# Altium footprint library Footprint.PcbLib: 411 footprints (part 11 of 26)
Each footprint in its own frame and in the unit in brackets; x right, y up, seen from the top. Pads: shape width x height; smd on the part's side, far side on the other; paste and mask are expansions set on the pad; w line width, h text height; cw(c..) or ccw(c..) is an arc to the next point about the centre after c.
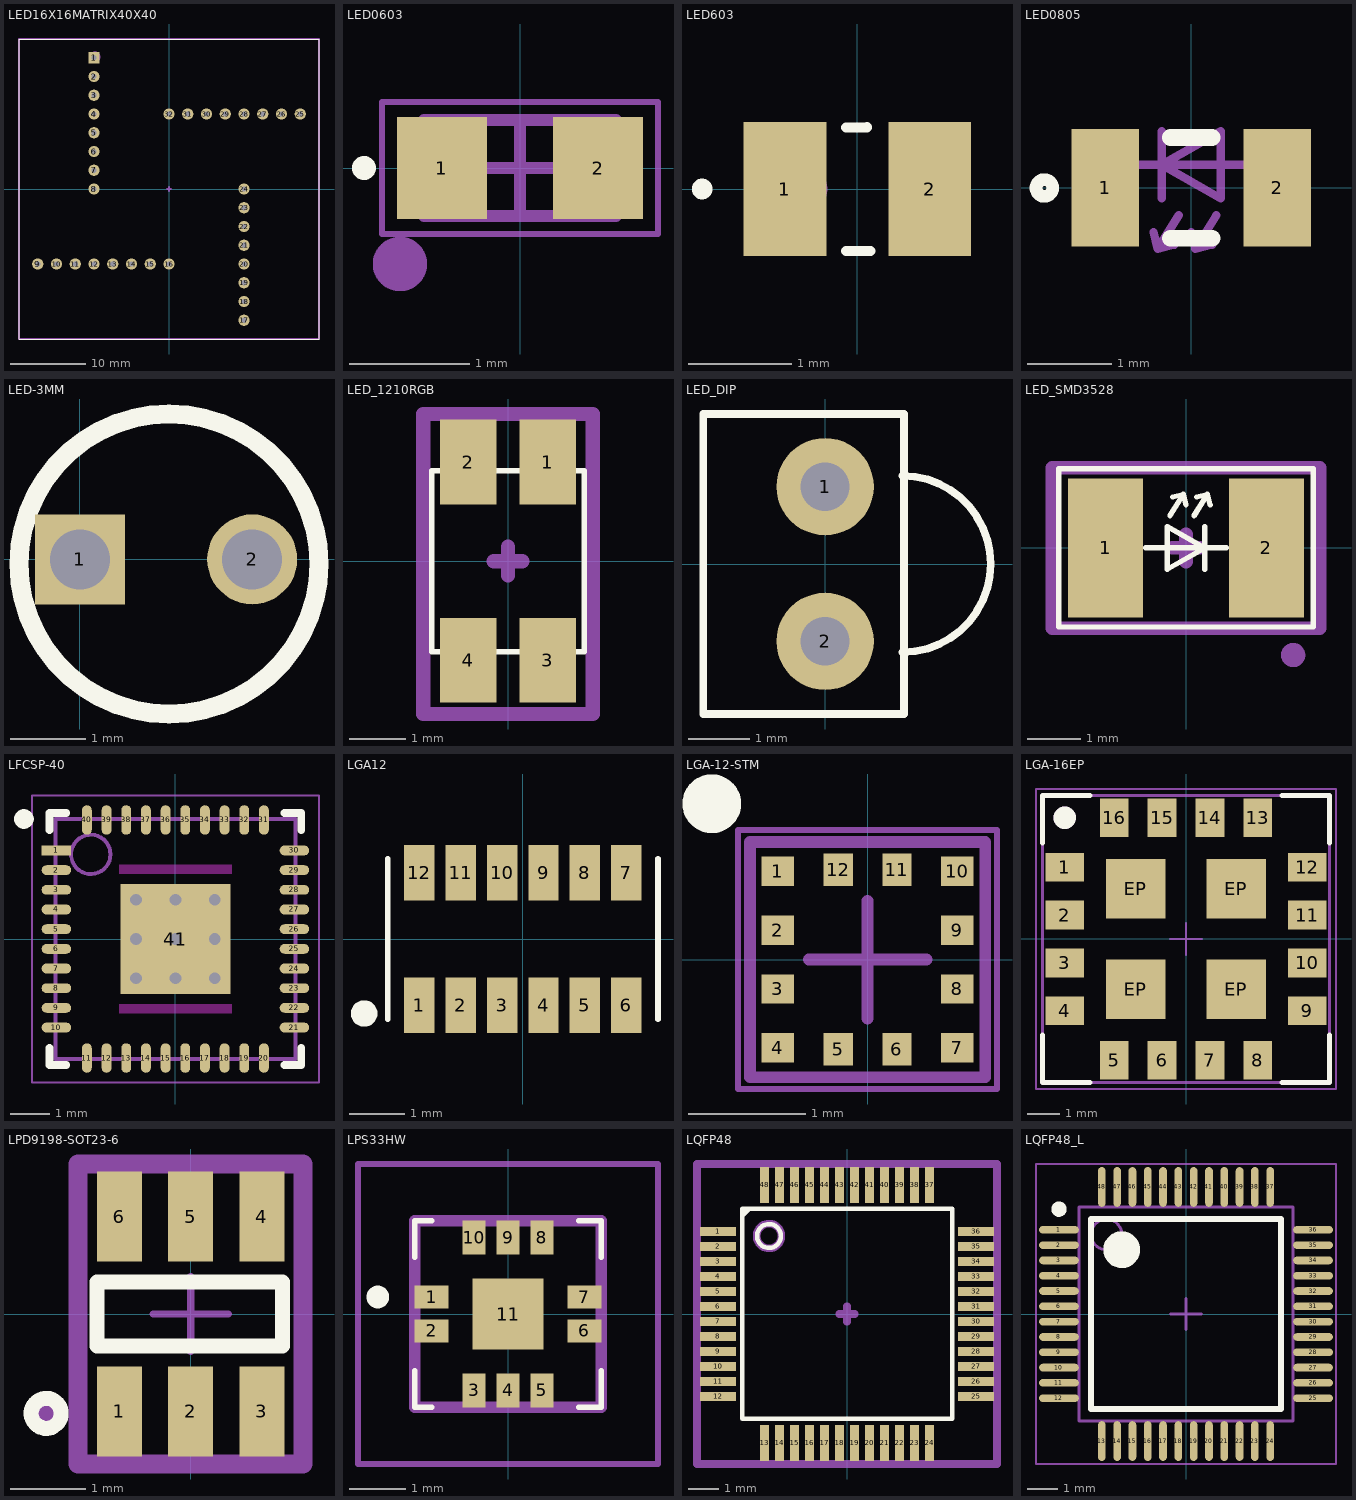
[diagram p10: the footprints below, top view; thin cyan lines are the x and y axes]

## LED16X16MATRIX40X40 [mm]
pads (32):
  rect 1.5x1.5 hole 0.7: 1(-10,17.5)
  round 1.5 hole 0.7: 2(-10,15) 3(-10,12.5) 4(-10,10) 5(-10,7.5) 6(-10,5) 7(-10,2.5) 8(-10,0) 9(-17.5,-10) 10(-15,-10) 11(-12.5,-10) 12(-10,-10) 13(-7.5,-10) 14(-5,-10) 15(-2.5,-10) 16(0,-10) 17(10,-17.5) 18(10,-15) 19(10,-12.5) 20(10,-10) 21(10,-7.5) 22(10,-5) 23(10,-2.5) 24(10,0) 25(17.5,10) 26(15,10) 27(12.5,10) 28(10,10) 29(7.5,10) 30(5,10) 31(2.5,10) 32(0,10)
Top Overlay:
  lines w0.1: -20,-20 -20,20 20,20 20,-20 -20,-20
Mechanical 15:
  circle w0.254: c-9.9,17.6 r0.64
  lines w0.254: -0.254,0 0.254,0 ; 0,-0.254 0,0.254 ; -20,-20 -20,20 20,20 20,-20 -20,-20
  text ".Designator" at -13.9,20.8 h1.52

## LED0603 [mm]
height 0.9
pads (2):
  rect 0.75x0.85 smd: 1(-0.65,0) 2(0.65,0)
Top Overlay:
  circle w0.1: c-1.3,0 r0.05
Mechanical 15:
  circle w0.254: c-1,-0.8 r0.1
  lines w0.05: -1.15,-0.55 1.15,-0.55 1.15,0.55 -1.15,0.55 -1.15,-0.55
  lines w0.1: -0.4,0 0.4,0 ; 0,-0.4 0,0.4 ; -0.8,-0.4 0.8,-0.4 0.8,0.4 -0.8,0.4 -0.8,-0.4
  text ".Designator" at -1.1,0.8 h1.52
3D body "User Library-LED_0603_WS.STEP": height 0.6, standoff 0, extent -0.8,-0.4 0.8,0.4

## LED603 [mm]
pads (2):
  rect 0.8x1.3 smd: 1(-0.7,0) 2(0.7,0)
Top Overlay:
  circle w0.1: c-1.5,0 r0.05
  lines w0.1: -0.106,-0.6 0.124,-0.6 ; -0.106,0.595 0.093,0.598
Mechanical 15:
  circle w0.254: c-0.559,0 r0.141

## LED0805 [mm]
height 0.8
pads (2):
  rect 0.8x1.4 smd: 1(-1.025,0) 2(1.025,0)
Top Overlay:
  circle w0.15: c-1.75,0 r0.1
  lines w0.2: -0.25,-0.6 0.25,-0.6 ; -0.25,0.6 0.25,0.6
Mechanical 15:
  circle w0.254: c-1.05,0 r0.025
  lines w0.1: -0.75,0.275 0.75,0.275 ; -0.45,-0.525 -0.4,-0.725 ; -0.35,-0.125 -0.35,0.675 ; -0.2,-0.675 -0.4,-0.725 ; -0.15,-0.325 -0.4,-0.725 ; 0,-0.525 0.05,-0.725 ; 0.25,-0.675 0.05,-0.725 ; 0.3,-0.325 0.05,-0.725 ; -0.35,0.275 0.35,-0.125 0.35,0.675 -0.35,0.275
3D body "User Library-led_0805.step": height 1.1, standoff 0, extent -1.01,-0.625 1.01,0.625

## LED-3MM [mm]
pads (2):
  rect 1.2x1.2 hole 0.8: 1(0,0)
  round 1.2 hole 0.8: 2(2.3,0)
Top Overlay:
  lines w0.254: -0.81,-0.062 cw(c1.19,-0.062) 3.19,-0.062 cw(c1.19,-0.062) -0.81,-0.062

## LED_1210RGB [mm]
pads (4):
  rect 1x1.5 smd: 1(0.7,1.75) 2(-0.7,1.75) 3(0.7,-1.75) 4(-0.7,-1.75)
Top Overlay:
  lines w0.1: -1.35,-1.6 1.35,-1.6 1.35,1.6 -1.35,1.6 -1.35,-1.6
Mechanical 15:
  circle w0.254: c0.7,1.9 r0.1
  lines w0.254: -0.254,0 0.254,0 ; 0,-0.254 0,0.254 ; -1.5,-2.7 -1.5,2.6 1.5,2.6 1.5,-2.7 -1.5,-2.7
  text ".Designator" at -1.5,3 h1.52
3D body "User Library-led_1210.step": height 1.1, standoff -0.05, extent -1.35,-1.62 1.35,1.62

## LED_DIP [mm] "LED; 2 Leads"
pads (2):
  round 1.6 hole 0.8: 1(0,1.27) 2(0,-1.27)
Top Overlay:
  lines w0.127: 1.27,-1.45 ccw(c1.27,0) 1.27,1.45 ; -2,-2.464 1.295,-2.464 1.295,2.464 -2,2.464 -2,-2.464

## LED_SMD3528 [mm]
pads (2):
  rect 1.4x2.6 smd: 1(-1.5,0) 2(1.5,0)
Top Overlay:
  lines w0.1: -0.75,0 0.75,0 ; -0.3,0.6 -0.05,1 ; -0.25,0.95 -0.05,1 ; 0,0.8 -0.05,1 ; 0.15,0.6 0.4,1 ; 0.2,0.95 0.4,1 ; 0.35,-0.4 0.35,0.4 ; 0.45,0.8 0.4,1 ; -2.375,-1.475 2.375,-1.475 2.375,1.475 -2.375,1.475 -2.375,-1.475 ; -0.35,-0.4 0.35,0 -0.35,0.4 -0.35,-0.4
Mechanical 15:
  circle w0.254: c2,-2 r0.1
  lines w0.254: -2.5,-1.5 -2.5,1.5 2.5,1.5 2.5,-1.5 -2.5,-1.5 ; -0.254,0 0.254,0 -0.254,0 ; 0,-0.254 0,0.254 0,-0.254
  text ".Designator" at -2.1,1.7 h1.52
3D body "User Library-KAA-3528.step": height 1.9, standoff 0, extent -1.7,-1.4 1.8,1.4

## LFCSP-40 [mm] "QFN, 40-Leads, Body 6x6mm, Pitch 0.5mm, Thermal Pad 4.6x4.6mm, IPC Medium Density"
height 0.8
pads (41):
  rect 0.75x0.25 smd: 1(-3.025,2.25)
  oval 0.75x0.25 smd: 2(-3.025,1.75) 3(-3.025,1.25) 4(-3.025,0.75) 5(-3.025,0.25) 6(-3.025,-0.25) 7(-3.025,-0.75) 8(-3.025,-1.25) 9(-3.025,-1.75) 10(-3.025,-2.25) 21(3.025,-2.25) 22(3.025,-1.75) 23(3.025,-1.25) 24(3.025,-0.75) 25(3.025,-0.25) 26(3.025,0.25) 27(3.025,0.75) 28(3.025,1.25) 29(3.025,1.75) 30(3.025,2.25)
  oval 0.25x0.75 smd: 11(-2.25,-3.025) 12(-1.75,-3.025) 13(-1.25,-3.025) 14(-0.75,-3.025) 15(-0.25,-3.025) 16(0.25,-3.025) 17(0.75,-3.025) 18(1.25,-3.025) 19(1.75,-3.025) 20(2.25,-3.025) 31(2.25,3.025) 32(1.75,3.025) 33(1.25,3.025) 34(0.75,3.025) 35(0.25,3.025) 36(-0.25,3.025) 37(-0.75,3.025) 38(-1.25,3.025) 39(-1.75,3.025) 40(-2.25,3.025)
  rect 2.8x2.8 smd: 41(0,0)
via 1,1 diameter 0.6 hole 0.3
via -1,1 diameter 0.6 hole 0.3
via 0,1 diameter 0.6 hole 0.3
via -1,0 diameter 0.6 hole 0.3
via 0,0 diameter 0.6 hole 0.3
via 1,0 diameter 0.6 hole 0.3
via -1,-1 diameter 0.6 hole 0.3
via 0,-1 diameter 0.6 hole 0.3
via 1,-1 diameter 0.6 hole 0.3
Top Layer keep-out:
  rectangle: -1.435,1.655 1.435,1.895
  region: 1.435,-1.655 -1.435,-1.655 -1.435,-1.895 1.435,-1.895
Top Overlay:
  circle w0.25: c-3.85,3.05 r0.125
  lines w0.2: -3.2,-2.775 -3.2,-3.2 -2.775,-3.2 ; -3.2,2.775 -3.2,3.2 -2.775,3.2 ; 2.775,-3.2 3.2,-3.2 3.2,-2.775 ; 2.775,3.2 3.2,3.2 3.2,2.775
Mechanical 13:
  circle w0.1: c-2.15,2.15 r0.5
  lines w0.1: -3.05,-3.05 3.05,-3.05 3.05,3.05 -3.05,3.05 -3.05,-3.05
Mechanical 15:
  lines w0.05: -3.65,-3.65 3.65,-3.65 3.65,3.65 -3.65,3.65 -3.65,-3.65
  lines w0.1: -0.5,0 0.5,0 ; 0,-0.5 0,0.5
3D body: height 0.8, standoff 0, extent -3.05,-3.05 3.05,3.05

## LGA12 [mm]
pads (12):
  rect 0.55x1 smd: 1(-1.875,-1.2) 2(-1.125,-1.2) 3(-0.375,-1.2) 4(0.375,-1.2) 5(1.125,-1.2) 6(1.875,-1.2) 7(1.875,1.2) 8(1.125,1.2) 9(0.375,1.2) 10(-0.375,1.2) 11(-1.125,1.2) 12(-1.875,1.2)
Top Overlay:
  circle w0.254: c-2.875,-1.35 r0.112
  lines w0.1: -2.45,-1.45 -2.45,1.45 ; 2.45,-1.45 2.45,1.45
Mechanical 15:
  text ".Designator" at -2.475,1.775 h0.5

## LGA-12-STM [mm] "LGA, 12-Leads, Body 2x2mm, Pitch 0.5mm"
height 1
pads (12):
  rect 0.275x0.25 smd: 1(-0.763,0.75) 2(-0.763,0.25) 3(-0.763,-0.25) 4(-0.763,-0.75) 7(0.763,-0.75) 8(0.763,-0.25) 9(0.763,0.25) 10(0.763,0.75)
  rect 0.25x0.275 smd: 5(-0.25,-0.762) 6(0.25,-0.762) 11(0.25,0.763) 12(-0.25,0.763)
Top Overlay:
  circle w0.25: c-1.325,1.325 r0.125
Mechanical 13:
  lines w0.1: -1,-1 1,-1 1,1 -1,1 -1,-1
Mechanical 15:
  lines w0.05: -1.1,-1.1 1.1,-1.1 1.1,1.1 -1.1,1.1 -1.1,-1.1
  lines w0.1: -0.5,0 0.5,0 ; 0,-0.5 0,0.5
3D body: height 1, standoff 0, extent -1,-1 1,1

## LGA-16EP [mm] "Variable Step Down Regulator Module, LGA-16EP, body 9x9mm"
height 2.96
pads (20):
  rect 1.2x0.9 smd paste-0.025: 1(-3.8,2.25) 2(-3.8,0.75) 3(-3.8,-0.75) 4(-3.8,-2.25) 9(3.8,-2.25) 10(3.8,-0.75) 11(3.8,0.75) 12(3.8,2.25)
  rect 0.9x1.2 smd paste-0.025: 5(-2.25,-3.8) 6(-0.75,-3.8) 7(0.75,-3.8) 8(2.25,-3.8) 13(2.25,3.8) 14(0.75,3.8) 15(-0.75,3.8) 16(-2.25,3.8)
  rect 1.85x1.85 smd paste-0.1: EP(-1.575,-1.575) EP(-1.575,1.575) EP(1.575,-1.575) EP(1.575,1.575)
Top Overlay:
  circle w0.5: c-3.8,3.8 r0.1
  lines w0.15: -4.5,-3 -4.5,-4.5 -3,-4.5 ; -4.5,3 -4.5,4.5 -3,4.5 ; 3,-4.5 4.5,-4.5 4.5,-3 ; 3,4.5 4.5,4.5 4.5,3
Mechanical 13:
  circle w0.5: c-3.8,3.8 r0.1
  lines w0.1: -4.5,-4.5 4.5,-4.5 4.5,4.5 -4.5,4.5 -4.5,-4.5
Mechanical 15:
  lines w0.05: -0.5,0 0.5,0 ; 0,-0.5 0,0.5 ; -4.7,-4.7 -4.7,4.7 4.7,4.7 4.7,-4.7 -4.7,-4.7
3D body "171031801.stp": height 3, standoff 0.04, extent -4.5,-4.5 4.5,4.5

## LPD9198-SOT23-6 [mm]
pads (6):
  rect 0.6x1.2 smd: 1(-0.95,-1.3) 2(0,-1.3) 3(0.95,-1.3) 4(0.95,1.3) 5(0,1.3) 6(-0.95,1.3)
Top Overlay:
  circle w0.2: c-1.925,-1.325 r0.2
  lines w0.2: -1.25,-0.425 1.225,-0.425 1.225,0.425 -1.25,0.425 -1.25,-0.425
Mechanical 15:
  circle w0.254: c-1.925,-1.325 r0.1
  lines w0.1: -0.5,0 0.5,0 -0.5,0 ; 0,-0.5 0,0.5 0,-0.5
  lines w0.254: -1.5,-2 1.5,-2 1.5,2 -1.5,2 -1.5,-2
  text ".Designator" at -1.5,2.2 h1.52
3D body "User Library-SOT23-6-4.STEP": height 1.1, standoff 0, extent -1.471,-1.179 1.429,1.221

## LPS33HW [mm]
pads (11):
  rect 0.6x0.4 smd: 1(-1.35,0.3) 2(-1.35,-0.3) 6(1.35,-0.3) 7(1.35,0.3)
  rect 0.4x0.6 smd: 3(-0.6,-1.35) 4(0,-1.35) 5(0.6,-1.35) 8(0.6,1.35) 9(0,1.35) 10(-0.6,1.35)
  rect 1.25x1.25 smd: 11(0,0)
Top Overlay:
  lines w0.1: -1.65,-1 -1.65,-1.65 -1.35,-1.65 ; -1.65,1 -1.65,1.65 -1.35,1.65 ; 1.25,-1.65 1.65,-1.65 1.65,-1 ; 1.25,1.65 1.65,1.65 1.65,1
  lines w0.2: -2.4,0.3 ccw(c-2.3,0.3) -2.2,0.3 ccw(c-2.3,0.3) -2.4,0.3
Mechanical 13:
  lines w0.2: -1.65,-1.65 -1.65,1.65 1.65,1.65 1.65,-1.65 -1.65,-1.65
Mechanical 15:
  lines w0.1: -2.65,-2.65 -2.65,2.65 2.65,2.65 2.65,-2.65 -2.65,-2.65
3D body "Деталь1.STEP": height 2.9, standoff 0, extent -1.65,-1.65 1.65,1.65

## LQFP48 [mm]
pads (48):
  rect 1.2x0.3 smd: 1(-4.3,2.75) 2(-4.3,2.25) 3(-4.3,1.75) 4(-4.3,1.25) 5(-4.3,0.75) 6(-4.3,0.25) 7(-4.3,-0.25) 8(-4.3,-0.75) 9(-4.3,-1.25) 10(-4.3,-1.75) 11(-4.3,-2.25) 12(-4.3,-2.75) 25(4.3,-2.75) 26(4.3,-2.25) 27(4.3,-1.75) 28(4.3,-1.25) 29(4.3,-0.75) 30(4.3,-0.25) 31(4.3,0.25) 32(4.3,0.75) 33(4.3,1.25) 34(4.3,1.75) 35(4.3,2.25) 36(4.3,2.75)
  rect 0.3x1.2 smd: 13(-2.75,-4.3) 14(-2.25,-4.3) 15(-1.75,-4.3) 16(-1.25,-4.3) 17(-0.75,-4.3) 18(-0.25,-4.3) 19(0.25,-4.3) 20(0.75,-4.3) 21(1.25,-4.3) 22(1.75,-4.3) 23(2.25,-4.3) 24(2.75,-4.3) 37(2.75,4.3) 38(2.25,4.3) 39(1.75,4.3) 40(1.25,4.3) 41(0.75,4.3) 42(0.25,4.3) 43(-0.25,4.3) 44(-0.75,4.3) 45(-1.25,4.3) 46(-1.75,4.3) 47(-2.25,4.3) 48(-2.75,4.3)
Top Overlay:
  circle w0.15: c-2.6,2.6 r0.4
  lines w0.15: -3.5,3.25 -3.25,3.5 ; -3.5,-3.5 3.5,-3.5 3.5,3.5 -3.5,3.5 -3.5,-3.5
Mechanical 15:
  circle w0.254: c-2.6,2.6 r0.412
  lines w0.254: -0.254,0 0.254,0 ; 0,-0.254 0,0.254 ; -5,-5 -5,5 5,5 5,-5 -5,-5
  text ".Designator" at -4,5.5 h1.52
3D body "User Library-LQFP48.step": height 1.5, standoff 0, extent -4.5,-4.5 4.5,4.5

## LQFP48_L [mm] "QFP, 48-Leads, Body 7x7mm, Pitch 0.5mm, IPC High Density"
height 1.6
pads (48):
  oval 1.3x0.25 smd: 1(-4.15,2.75) 2(-4.15,2.25) 3(-4.15,1.75) 4(-4.15,1.25) 5(-4.15,0.75) 6(-4.15,0.25) 7(-4.15,-0.25) 8(-4.15,-0.75) 9(-4.15,-1.25) 10(-4.15,-1.75) 11(-4.15,-2.25) 12(-4.15,-2.75) 25(4.15,-2.75) 26(4.15,-2.25) 27(4.15,-1.75) 28(4.15,-1.25) 29(4.15,-0.75) 30(4.15,-0.25) 31(4.15,0.25) 32(4.15,0.75) 33(4.15,1.25) 34(4.15,1.75) 35(4.15,2.25) 36(4.15,2.75)
  oval 0.25x1.3 smd: 13(-2.75,-4.15) 14(-2.25,-4.15) 15(-1.75,-4.15) 16(-1.25,-4.15) 17(-0.75,-4.15) 18(-0.25,-4.15) 19(0.25,-4.15) 20(0.75,-4.15) 21(1.25,-4.15) 22(1.75,-4.15) 23(2.25,-4.15) 24(2.75,-4.15) 37(2.75,4.15) 38(2.25,4.15) 39(1.75,4.15) 40(1.25,4.15) 41(0.75,4.15) 42(0.25,4.15) 43(-0.25,4.15) 44(-0.75,4.15) 45(-1.25,4.15) 46(-1.75,4.15) 47(-2.25,4.15) 48(-2.75,4.15)
Top Overlay:
  circle w0.25: c-4.15,3.425 r0.125
  circle w0.6: c-2.1,2.1 r0.3
  lines w0.2: -3.1,-3.1 -3.1,3.1 3.1,3.1 3.1,-3.1 -3.1,-3.1
Mechanical 13:
  circle w0.1: c-2.6,2.6 r0.5
  lines w0.1: -3.5,-3.5 -3.5,3.5 3.5,3.5 3.5,-3.5 -3.5,-3.5
Mechanical 15:
  lines w0.05: -4.9,-4.9 -4.9,4.9 4.9,4.9 4.9,-4.9 -4.9,-4.9
  lines w0.1: -0.5,0 0.5,0 ; 0,-0.5 0,0.5
3D body: height 1.6, standoff 0.05, extent -3.5,-3.5 3.5,3.5